# Altium footprint library Kondensator_470uF_25V.PcbLib: 1 footprints
Each footprint in its own frame and in the unit in brackets; x right, y up, seen from the top. Pads: shape width x height; smd on the part's side, far side on the other; paste and mask are expansions set on the pad; w line width, h text height; cw(c..) or ccw(c..) is an arc to the next point about the centre after c.
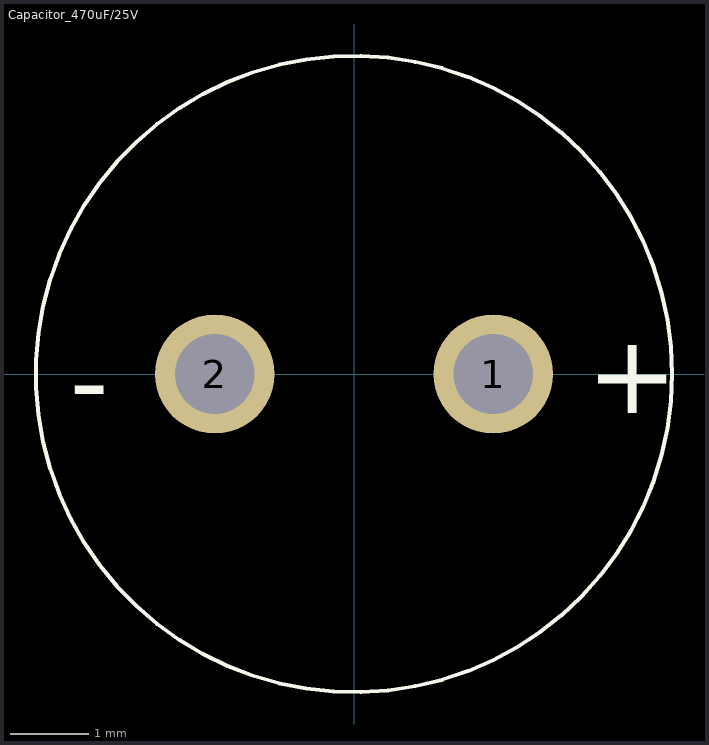
[diagram p0: the footprint, top view; thin cyan lines are the x and y axes]

## Capacitor_470uF/25V [mil]
pads (2):
  round 60 hole 40: 1(70,0) 2(-70,0)
Top Overlay:
  circle w2: c0,0 r160
  text "+" at 117,-19.66 h40
  text "-" at -143,-22.99 h40